# EAGLE library part ISO1050DUB (library ISO1050DUB)
CAN Transceiver 1Mbit/s ISO 11898-2 Silent-Mode 8pins SOIC Source: Datasheet <https://datasheet.datasheetarchive.com/originals/distributors/Datasheets-SFU2/DSASFU100032000.pdf>
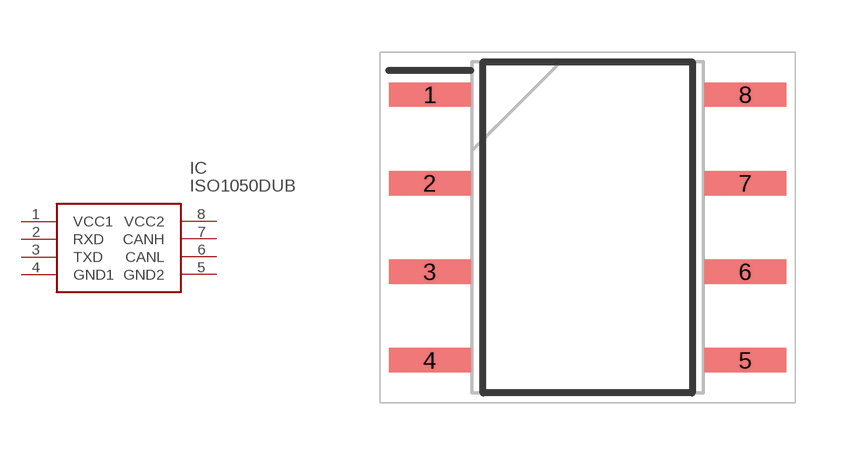
[diagram p0: symbol with the pads of SOP254P1040X485-8N; footprint SOP254P1040X485-8N]

Designator prefix IC

## ISO1050DUB (Arrow_Part_Number: ISO1050DUB; Arrow_Price-Stock: https://www.arrow.com/en/products/iso1050dub/texas-instruments?region=nac; Description: CAN Transceiver 1Mbit/s ISO 11898-2 Silent-Mode 8pins SOIC; Height: 4.85mm; Manufacturer_Name: Texas Instruments; Manufacturer_Part_Number: ISO1050DUB; Mouser_Part_Number: 595-ISO1050DUB; Mouser_Price-Stock: https://www.mouser.co.uk/ProductDetail/Texas-Instruments/ISO1050DUB?qs=IK5e5L0zOXiBKtns%252BwxBWw%3D%3D)  [SOP254P1040X485-8N]
1  VCC1
2  RXD
3  TXD
4  GND1
5  GND2
6  CANL
7  CANH
8  VCC2

## Footprint SOP254P1040X485-8N (pad centres in mm)
DUB (R-PDSO-G8)
smd 2.35 x 0.7: 1 -4.525,3.81; 2 -4.525,1.27; 3 -4.525,-1.27; 4 -4.525,-3.81; 5 4.525,-3.81; 6 4.525,-1.27; 7 4.525,1.27; 8 4.525,3.81